# Altium footprint library FootPrintLib_11.PcbLib: 376 footprints (part 11 of 24)
Each footprint in its own frame and in the unit in brackets; x right, y up, seen from the top. Pads: shape width x height; smd on the part's side, far side on the other; paste and mask are expansions set on the pad; w line width, h text height; cw(c..) or ccw(c..) is an arc to the next point about the centre after c.
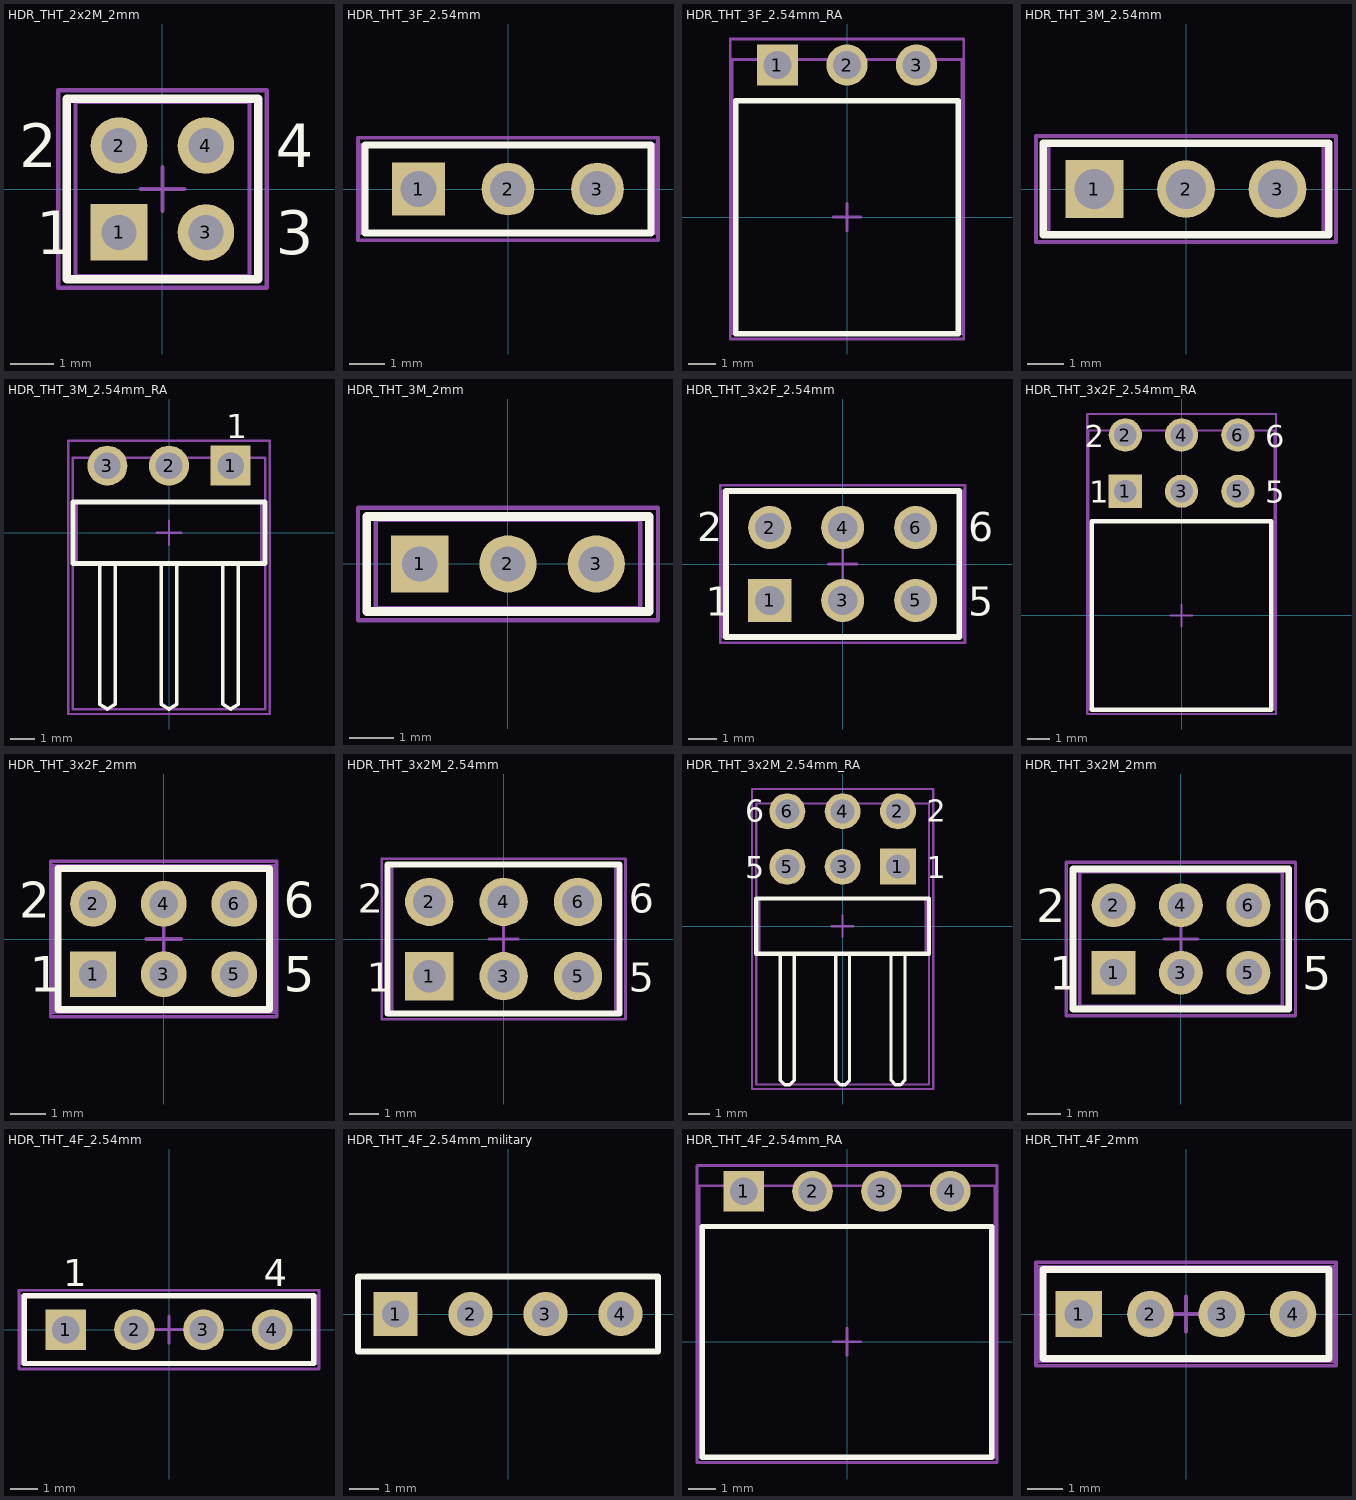
[diagram p10: the footprints below, top view; thin cyan lines are the x and y axes]

## HDR_THT_2x2M_2mm [mm] "Pin Header, pitch 2.00 mm, THT, Vertical, dual row, 4p"
height 6
pads (4):
  rect 1.3x1.3 hole 0.8: 1(-1,-1)
  round 1.3 hole 0.8: 2(-1,1) 3(1,-1) 4(1,1)
Top Overlay:
  lines w0.2: -2.2,-2.075 2.2,-2.075 2.2,2.075 -2.2,2.075 -2.2,-2.075
  text "2" at -3.3,0.5 h1
  text "4" at 2.6,0.5 h1
  text "3" at 2.6,-1.5 h1
  text "1" at -2.9,-1.5 h1
Mechanical 11:
  lines w0.1: -2,-2 2,-2 2,2 -2,2 -2,-2
Mechanical 13:
  lines w0.1: -2.2,-2.075 2.2,-2.075 2.2,2.075 -2.2,2.075 -2.2,-2.075
Mechanical 15:
  lines w0.1: -0.5,0 0.5,0 ; 0,-0.5 0,0.5 ; -2.4,-2.275 2.4,-2.275 2.4,2.275 -2.4,2.275 -2.4,-2.275
3D body "62000421121.stp": height 6.05, standoff -2.65, extent -2,-2 2,2

## HDR_THT_3F_2.54mm [mm] "Socket Header, Pitch 2.54 mm, THT, Vertical, single row, 3p"
height 8.5
pads (3):
  rect 1.5x1.5 hole 1.02: 1(-2.54,0)
  round 1.5 hole 1.02: 2(0,0) 3(2.54,0)
Top Overlay:
  lines w0.2: -4.06,-1.25 4.06,-1.25 4.06,1.25 -4.06,1.25 -4.06,-1.25
Mechanical 11:
  lines w0.1: -4.06,-1.25 4.06,-1.25 4.06,1.25 -4.06,1.25 -4.06,-1.25
Mechanical 13:
  lines w0.1: -4.185,-1.25 -4.185,1.25 4.185,1.25 4.185,-1.25 -4.185,-1.25
Mechanical 15:
  lines w0.1: -0.5,0 0.5,0 ; 0,-0.5 0,0.5 ; -4.26,-1.45 -4.26,1.45 4.26,1.45 4.26,-1.45 -4.26,-1.45
3D body "61300311821.stp": height 8.55, standoff -3.06, extent -4.06,-1.25 4.06,1.25

## HDR_THT_3F_2.54mm_RA [mm] "Socket Header, Pitch 2.54 mm, THT, Angled, single row, 3p"
height 2.5
pads (3):
  rect 1.5x1.5 hole 1.02: 1(-2.54,5.55)
  round 1.5 hole 1.02: 2(0,5.55) 3(2.54,5.55)
Top Overlay:
  lines w0.2: -4.06,-4.25 4.06,-4.25 4.06,4.25 -4.06,4.25 -4.06,-4.25
Mechanical 11:
  lines w0.1: -4.06,-4.25 -4.06,4.25 4.06,4.25 4.06,-4.25 -4.06,-4.25
Mechanical 13:
  lines w0.1: -4.185,-4.25 4.185,-4.25 4.185,5.75 -4.185,5.75 -4.185,-4.25
Mechanical 15:
  lines w0.1: -0.5,0 0.5,0 ; 0,-0.5 0,0.5 ; -4.26,-4.45 4.26,-4.45 4.26,6.5 -4.26,6.5 -4.26,-4.45
3D body "613003143121.stp": height 2.55, standoff -3.04, extent -4.06,-4.25 4.06,5.75

## HDR_THT_3M_2.54mm [mm] "Pin Header, pitch 2.54 mm, THT, Vertical, single row, 3p"
height 8.54
pads (3):
  rect 1.6x1.6 hole 1.1: 1(-2.54,0)
  round 1.6 hole 1.1: 2(0,0) 3(2.54,0)
Top Overlay:
  lines w0.2: -3.96,-1.27 3.96,-1.27 3.96,1.27 -3.96,1.27 -3.96,-1.27
Mechanical 11:
  lines w0.1: -3.81,-1.27 -3.81,1.27 3.81,1.27 3.81,-1.27 -3.81,-1.27
Mechanical 13:
  lines w0.1: -3.96,-1.27 3.96,-1.27 3.96,1.27 -3.96,1.27 -3.96,-1.27
Mechanical 15:
  lines w0.1: -0.5,0 0.5,0 ; 0,-0.5 0,0.5 ; -4.16,-1.47 4.16,-1.47 4.16,1.47 -4.16,1.47 -4.16,-1.47
3D body "61300311121.stp": height 8.57, standoff -2.97, extent -3.81,-1.27 3.81,1.27

## HDR_THT_3M_2.54mm_RA [mm] "Pin Header, pitch 2.54 mm, THT, Angled, single row, 3p"
height 2.54
pads (3):
  rect 1.65x1.65 hole 1.1: 1(2.54,2.77)
  round 1.65 hole 1.1: 2(0,2.77) 3(-2.54,2.77)
Top Overlay:
  lines w0.15: -2.86,-1.27 -2.86,-7.07 -2.54,-7.27 -2.22,-7.07 -2.22,-1.27 ; -0.32,-1.27 -0.32,-7.07 0,-7.27 0.32,-7.07 0.32,-1.27 ; 2.22,-1.27 2.22,-7.07 2.54,-7.27 2.86,-7.07 2.86,-1.27
  lines w0.2: -3.96,-1.27 3.96,-1.27 3.96,1.27 -3.96,1.27 -3.96,-1.27
  text "1" at 2.37,3.9 h1
Mechanical 11:
  lines w0.1: -3.81,-1.27 3.81,-1.27 3.81,1.27 -3.81,1.27 -3.81,-1.27
Mechanical 13:
  lines w0.1: -3.96,-7.27 -3.96,3.09 3.96,3.09 3.96,-7.27 -3.96,-7.27
Mechanical 15:
  lines w0.1: -0.5,0 0.5,0 ; 0,-0.5 0,0.5 ; -4.16,-7.47 -4.16,3.795 4.16,3.795 4.16,-7.47 -4.16,-7.47
3D body "61300311021.stp": height 2.62, standoff -2.92, extent -3.81,-7.27 3.81,3.09

## HDR_THT_3M_2mm [mm] "Pin Header, pitch 2.00 mm, THT, Vertical, single row, 3p"
height 6.35
pads (3):
  rect 1.3x1.3 hole 0.8: 1(-2,0)
  round 1.3 hole 0.8: 2(0,0) 3(2,0)
Top Overlay:
  lines w0.2: -3.2,-1.075 3.2,-1.075 3.2,1.075 -3.2,1.075 -3.2,-1.075
Mechanical 11:
  lines w0.1: -3,-1 3,-1 3,1 -3,1 -3,-1
Mechanical 13:
  lines w0.1: -3.2,-1.075 3.2,-1.075 3.2,1.075 -3.2,1.075 -3.2,-1.075
Mechanical 15:
  lines w0.1: -0.5,0 0.5,0 ; 0,-0.5 0,0.5 ; -3.4,-1.275 3.4,-1.275 3.4,1.275 -3.4,1.275 -3.4,-1.275
3D body "62000311121.stp": height 6.05, standoff -2.65, extent -3,-1 3,1

## HDR_THT_3x2F_2.54mm [mm] "Socket Header, Pitch 2.54 mm, THT, Vertical, dual row, 6p"
height 8.4
pads (6):
  rect 1.5x1.5 hole 1.02: 1(-2.54,-1.27)
  round 1.5 hole 1.02: 2(-2.54,1.27) 3(0,-1.27) 4(0,1.27) 5(2.54,-1.27) 6(2.54,1.27)
Top Overlay:
  lines w0.2: -4.06,-2.54 4.06,-2.54 4.06,2.54 -4.06,2.54 -4.06,-2.54
  text "1" at -4.77,-1.8 h1
  text "2" at -5.07,0.8 h1
  text "5" at 4.37,-1.8 h1
  text "6" at 4.37,0.8 h1
Mechanical 11:
  lines w0.1: -4.06,-2.54 -4.06,2.54 4.06,2.54 4.06,-2.54 -4.06,-2.54
Mechanical 13:
  lines w0.1: -4.185,-2.54 4.185,-2.54 4.185,2.54 -4.185,2.54 -4.185,-2.54
Mechanical 15:
  lines w0.1: -0.5,0 0.5,0 ; 0,-0.5 0,0.5 ; -4.26,-2.74 4.26,-2.74 4.26,2.74 -4.26,2.74 -4.26,-2.74
3D body "61300621821.stp": height 8.45, standoff -3.05, extent -4.06,-2.54 4.06,2.54

## HDR_THT_3x2F_2.54mm_RA [mm] "Socket Header, Pitch 2.54 mm, THT, Angled, dual row, 6p"
height 5.08
pads (6):
  rect 1.5x1.5 hole 1.02: 1(-2.54,5.61)
  round 1.5 hole 1.02: 2(-2.54,8.15) 3(0,5.61) 4(0,8.15) 5(2.54,5.61) 6(2.54,8.15)
Top Overlay:
  lines w0.2: -4.06,-4.25 4.06,-4.25 4.06,4.25 -4.06,4.25 -4.06,-4.25
  text "1" at -4.17,5.1 h1
  text "2" at -4.37,7.6 h1
  text "6" at 3.77,7.6 h1
  text "5" at 3.77,5.1 h1
Mechanical 11:
  lines w0.1: -4.06,-4.25 -4.06,4.25 4.06,4.25 4.06,-4.25 -4.06,-4.25
Mechanical 13:
  lines w0.1: -4.21,-4.25 -4.21,8.35 4.21,8.35 4.21,-4.25 -4.21,-4.25
Mechanical 15:
  lines w0.1: -0.5,0 0.5,0 ; 0,-0.5 0,0.5 ; -4.26,-4.45 -4.26,9.1 4.26,9.1 4.26,-4.45 -4.26,-4.45
3D body "613006243121.stp": height 5.05, standoff -3.25, extent -4.06,-4.25 4.06,8.35

## HDR_THT_3x2F_2mm [mm] "Socket Header, Pitch 2.00 mm, THT, Vertical, dual row, 6p"
height 4.45
pads (6):
  rect 1.3x1.3 hole 0.8: 1(-2,-1)
  round 1.3 hole 0.8: 2(-2,1) 3(0,-1) 4(0,1) 5(2,-1) 6(2,1)
Top Overlay:
  lines w0.2: -3,-2 -3,2 3,2 3,-2 -3,-2
  text "5" at 3.4,-1.5 h1
  text "6" at 3.4,0.6 h1
  text "1" at -3.8,-1.5 h1
  text "2" at -4.1,0.6 h1
Mechanical 11:
  lines w0.1: -3,-2 -3,2 3,2 3,-2 -3,-2
Mechanical 13:
  lines w0.1: -3.15,-2.075 -3.15,2.075 3.15,2.075 3.15,-2.075 -3.15,-2.075
Mechanical 15:
  lines w0.1: -0.5,0 0.5,0 ; 0,-0.5 0,0.5 ; -3.2,-2.2 -3.2,2.2 3.2,2.2 3.2,-2.2 -3.2,-2.2
3D body "62000621821.stp": height 4.35, standoff -2.35, extent -3.25,-2 3.25,2

## HDR_THT_3x2M_2.54mm [mm] "Pin Header, pitch 2.54 mm, THT, Vertical, dual row, 6p"
height 8.54
pads (6):
  rect 1.65x1.65 hole 1.1: 1(-2.54,-1.27)
  round 1.65 hole 1.1: 2(-2.54,1.27) 3(0,-1.27) 4(0,1.27) 5(2.54,-1.27) 6(2.54,1.27)
Top Overlay:
  lines w0.2: -3.96,-2.54 -3.96,2.54 3.96,2.54 3.96,-2.54 -3.96,-2.54
  text "2" at -4.97,0.9 h1
  text "1" at -4.67,-1.8 h1
  text "5" at 4.27,-1.8 h1
  text "6" at 4.27,0.9 h1
Mechanical 11:
  lines w0.1: -3.81,-2.54 -3.81,2.54 3.81,2.54 3.81,-2.54 -3.81,-2.54
Mechanical 13:
  lines w0.1: -3.96,-2.54 -3.96,2.54 3.96,2.54 3.96,-2.54 -3.96,-2.54
Mechanical 15:
  lines w0.1: -0.5,0 0.5,0 ; 0,-0.5 0,0.5 ; -4.16,-2.74 -4.16,2.74 4.16,2.74 4.16,-2.74 -4.16,-2.74
3D body "61300621121.stp": height 8.59, standoff -2.95, extent -3.81,-2.54 3.81,2.54

## HDR_THT_3x2M_2.54mm_RA [mm] "Pin Header, pitch 2.54 mm, THT, Angled, dual row, 6p"
height 5.08
pads (6):
  rect 1.65x1.65 hole 1.1: 1(2.54,2.73)
  round 1.65 hole 1.1: 2(2.54,5.27) 3(0,2.73) 4(0,5.27) 5(-2.54,2.73) 6(-2.54,5.27)
Top Overlay:
  lines w0.15: -2.86,-1.335 -2.86,-7.07 -2.66,-7.27 -2.42,-7.27 -2.22,-7.07 -2.22,-1.31 ; -0.32,-1.335 -0.32,-7.07 -0.12,-7.27 0.12,-7.27 0.32,-7.07 0.32,-1.31 ; 2.22,-1.335 2.22,-7.07 2.42,-7.27 2.66,-7.27 2.86,-7.07 2.86,-1.31
  lines w0.2: -3.96,-1.27 3.96,-1.27 3.96,1.27 -3.96,1.27 -3.96,-1.27
  text "5" at -4.47,2.2 h1
  text "6" at -4.47,4.8 h1
  text "2" at 3.87,4.8 h1
  text "1" at 3.87,2.2 h1
Mechanical 11:
  lines w0.1: -3.81,-1.27 3.81,-1.27 3.81,1.27 -3.81,1.27 -3.81,-1.27
Mechanical 13:
  lines w0.1: -3.96,-7.27 -3.96,5.63 3.96,5.63 3.96,-7.27 -3.96,-7.27
Mechanical 15:
  lines w0.1: -0.5,0 0.5,0 ; 0,-0.5 0,0.5 ; -4.16,-7.47 -4.16,6.295 4.16,6.295 4.16,-7.47 -4.16,-7.47
3D body "61300621021.stp": height 5.14, standoff -2.94, extent -3.81,-7.27 3.81,5.63

## HDR_THT_3x2M_2mm [mm] "Pin Header, pitch 2.00 mm, THT, Vertical, dual row, 6p"
height 6
pads (6):
  rect 1.3x1.3 hole 0.8: 1(-2,-1)
  round 1.3 hole 0.8: 2(-2,1) 3(0,-1) 4(0,1) 5(2,-1) 6(2,1)
Top Overlay:
  lines w0.2: -3.2,-2.075 -3.2,2.075 3.2,2.075 3.2,-2.075 -3.2,-2.075
  text "6" at 3.6,0.5 h1
  text "5" at 3.6,-1.5 h1
  text "1" at -3.9,-1.5 h1
  text "2" at -4.3,0.5 h1
Mechanical 11:
  lines w0.1: -3,-2 -3,2 3,2 3,-2 -3,-2
Mechanical 13:
  lines w0.1: -3.2,-2.075 -3.2,2.075 3.2,2.075 3.2,-2.075 -3.2,-2.075
Mechanical 15:
  lines w0.1: -0.5,0 0.5,0 ; 0,-0.5 0,0.5 ; -3.4,-2.275 -3.4,2.275 3.4,2.275 3.4,-2.275 -3.4,-2.275
3D body "62000621121.stp": height 6.05, standoff -2.65, extent -3,-2 3,2

## HDR_THT_4F_2.54mm [mm] "Socket Header, Pitch 2.54 mm, THT, Vertical, single row, 4p"
height 8.5
pads (4):
  rect 1.5x1.5 hole 1.02: 1(-3.81,0)
  round 1.5 hole 1.02: 2(-1.27,0) 3(1.27,0) 4(3.81,0)
Top Overlay:
  lines w0.2: -5.33,-1.25 -5.33,1.25 5.33,1.25 5.33,-1.25 -5.33,-1.25
  text "4" at 3.5,1.6 h1
  text "1" at -3.9,1.6 h1
Mechanical 11:
  lines w0.1: -5.33,-1.25 -5.33,1.25 5.33,1.25 5.33,-1.25 -5.33,-1.25
Mechanical 13:
  lines w0.1: -5.455,-1.25 5.455,-1.25 5.455,1.25 -5.455,1.25 -5.455,-1.25
Mechanical 15:
  lines w0.1: -0.5,0 0.5,0 ; 0,-0.5 0,0.5 ; -5.53,-1.45 5.53,-1.45 5.53,1.45 -5.53,1.45 -5.53,-1.45
3D body "61300411821.stp": height 8.55, standoff -3.05, extent -5.33,-1.25 5.33,1.25

## HDR_THT_4F_2.54mm_military [mm] "Pin Header, pitch 2.54 mm, THT, Vertical, single row, 4p"
pads (4):
  rect 1.5x1.5 hole 0.914: 1(-3.81,0)
  round 1.5 hole 0.914: 2(-1.27,0) 3(1.27,0) 4(3.81,0)
Top Overlay:
  lines w0.2: -5.08,-1.27 5.08,-1.27 5.08,1.27 -5.08,1.27 -5.08,-1.27
3D body "User Library-RM254_4pin.STEP": height 6.02, standoff -3.1, extent -5.08,-1.32 5.08,1.22

## HDR_THT_4F_2.54mm_RA [mm] "Socket Header, Pitch 2.54 mm, THT, Angled, single row, 4p"
height 2.5
pads (4):
  rect 1.5x1.5 hole 1.02: 1(-3.81,5.55)
  round 1.5 hole 1.02: 2(-1.27,5.55) 3(1.27,5.55) 4(3.81,5.55)
Top Overlay:
  lines w0.2: -5.33,-4.25 5.33,-4.25 5.33,4.25 -5.33,4.25 -5.33,-4.25
Mechanical 11:
  lines w0.1: -5.33,-4.25 -5.33,4.25 5.33,4.25 5.33,-4.25 -5.33,-4.25
Mechanical 13:
  lines w0.1: -5.455,-4.25 5.455,-4.25 5.455,5.75 -5.455,5.75 -5.455,-4.25
Mechanical 15:
  lines w0.1: -0.5,0 0.5,0 ; 0,-0.5 0,0.5 ; -5.53,-4.45 5.53,-4.45 5.53,6.5 -5.53,6.5 -5.53,-4.45
3D body "613004143121.stp": height 2.55, standoff -3.04, extent -5.33,-4.25 5.33,5.75

## HDR_THT_4F_2mm [mm] "Socket Header, Pitch 2.00 mm, THT, Vertical, single row, 4p"
height 4.45
pads (4):
  rect 1.3x1.3 hole 0.8: 1(-3,0)
  round 1.3 hole 0.8: 2(-1,0) 3(1,0) 4(3,0)
Top Overlay:
  lines w0.2: -4,-1.25 4,-1.25 4,1.25 -4,1.25 -4,-1.25
Mechanical 11:
  lines w0.1: -4,-1.25 4,-1.25 4,1.25 -4,1.25 -4,-1.25
Mechanical 13:
  lines w0.1: -4.15,-1.325 4.15,-1.325 4.15,1.325 -4.15,1.325 -4.15,-1.325
Mechanical 15:
  lines w0.1: -0.5,0 0.5,0 ; 0,-0.5 0,0.5 ; -4.2,-1.45 4.2,-1.45 4.2,1.45 -4.2,1.45 -4.2,-1.45
3D body "62000411821.stp": height 4.35, standoff -2.65, extent -4.25,-1.25 4.25,1.25